# Altium footprint library DO.PcbLib: 6 footprints
Each footprint in its own frame and in the unit in brackets; x right, y up, seen from the top. Pads: shape width x height; smd on the part's side, far side on the other; paste and mask are expansions set on the pad; w line width, h text height; cw(c..) or ccw(c..) is an arc to the next point about the centre after c.
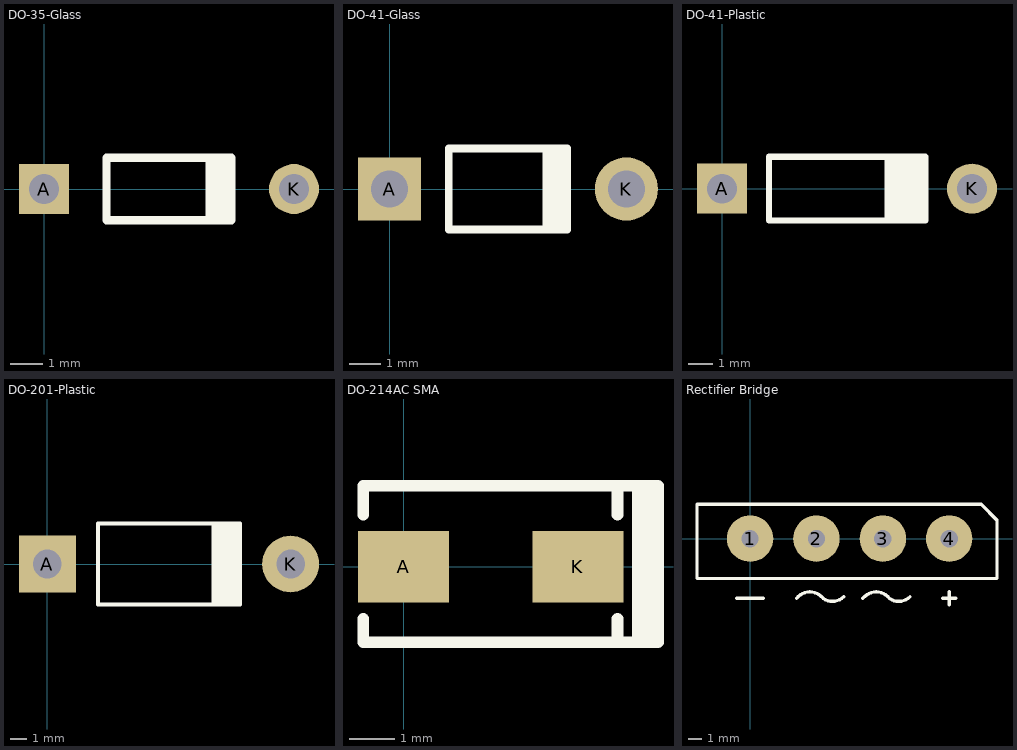
[diagram p0: the footprints below, top view; thin cyan lines are the x and y axes]

## DO-35-Glass [mil] "Diode, Axial; Body 3.8 x 1.9 mm (LxDia. max), Lead Dia. 0.53 mm (max), Lead Spacing 7.62 mm; 3D Wagner Bernardo"
height 74.8
pads (2):
  rect 60x60 hole 35.43: A(0,0)
  round 60 hole 35.43: K(300,0)
Top Overlay:
  rectangle: 193.5,-37.4 225,37.4
  lines w10: 75,-37.4 75,37.4 225,37.4 225,-37.4 75,-37.4
3D body "DO-35-GLASS.STEP": height 76.85, standoff -98.74, extent -10.24,-38 310.24,37.59

## DO-41-Glass [mil] "Diode, Axial; Body 4.1 x 2.6 mm (LxDia. max), Lead Dia. 0.86 mm (max), Lead Spacing 7.62 mm; 3D Julien THIEREN"
height 102.36
pads (2):
  rect 80x80 hole 47.24: A(0,0)
  round 80 hole 47.24: K(300,0)
Top Overlay:
  rectangle: 193.5,-51.18 225,51.18
  lines w10: 75,-51.18 75,51.18 225,51.18 225,-51.18 75,-51.18
3D body "DO-41-Glass.step": height 110.61, standoff -60, extent -14.5,-53 316.5,52

## DO-41-Plastic [mil] "Diode, Axial; Body 4.1 x 2.6 mm (LxDia. max), Lead Dia. 1.14 mm (max), Lead Spacing 10.16 mm; 3D Wagner Bernardo"
height 102.36
pads (2):
  rect 80x80 hole 47.24: A(0,0)
  round 80 hole 47.24: K(400,0)
Top Overlay:
  rectangle: 260,-52.36 325,50
  lines w10: 75,-51.18 75,51.18 325,51.18 325,-51.18 75,-51.18
3D body "DO-41-PLASTIC.STEP": height 111.89, standoff -98.74, extent -15,-55 418.86,51.3

## DO-201-Plastic [mil] "Diode, Axial; Body 9.5 x 5.3 mm (LxDia. max), Lead Dia. 1.30 mm (max), Lead Spacing 15.24 mm; 3D Wagner Bernardo"
height 102.36
pads (2):
  rect 140x140 hole 70.87: A(0,0)
  round 140 hole 70.87: K(600,0)
Top Overlay:
  rectangle: 405,-100 475,100
  lines w10: 125,-100 125,100 475,100 475,-100 125,-100
3D body "DO-201AD.step": height 239.21, standoff -217.48, extent -25,-110.24 626.97,110.24

## DO-214AC SMA [mm]
pads (2):
  rect 2x1.57 smd: A(0,0) K(3.83,0)
Top Overlay:
  lines w0.254: -0.889,-1.143 -0.889,-1.651 4.699,-1.651 ; -0.889,1.143 -0.889,1.778 4.699,1.778 ; 4.699,-1.143 4.699,-1.651 ; 4.699,1.143 4.699,1.778 ; 5.143,1.778 5.143,-1.651 5.334,-1.651 ; 4.699,-1.651 5.588,-1.651 ; 4.699,1.778 5.588,1.778 ; 5.334,-1.651 5.334,1.778 5.588,1.778 ; 5.334,-1.651 5.588,-1.651 ; 5.588,-1.651 5.588,1.778
3D body "User Library-DO-214AC SMA.step": height 2.53, standoff 0.12, extent -0.695,-1.27 4.505,1.33

## Rectifier Bridge [mm] "PBU605 - 600V 6A"
pads (4):
  round 3.5 hole 1.3 unplated: 1(0,0) 2(5,0) 3(10,0) 4(15,0)
Top Overlay:
  lines w0.254: -1,-4.5 1,-4.5 ; 3.5,-4.5 3.646,-4.354 cw(c4.5,-5.207) 4.5,-4 cw(c4.5,-5.207) 5.354,-4.354 5.5,-4.5 ccw(c6.197,-3.514) 7.05,-4.368 ; 8.5,-4.5 8.646,-4.354 cw(c9.5,-5.207) 9.5,-4 cw(c9.5,-5.207) 10.354,-4.354 10.5,-4.5 ccw(c11.197,-3.514) 12.05,-4.368 ; 14.5,-4.5 15.5,-4.5 ; 15,-5 15,-4 ; -4,-3 18.6,-3 18.6,1.4 17.4,2.6 6.6,2.6 -4,2.6 -4,-3
3D body "User Library-bridge-9528.step": height 18.75, standoff -1.75, extent -2.9,-2.3 17.9,1.2